# Altium footprint library ESP32-C5-MINI-1U.PcbLib: 1 footprints
Each footprint in its own frame and in the unit in brackets; x right, y up, seen from the top. Pads: shape width x height; smd on the part's side, far side on the other; paste and mask are expansions set on the pad; w line width, h text height; cw(c..) or ccw(c..) is an arc to the next point about the centre after c.
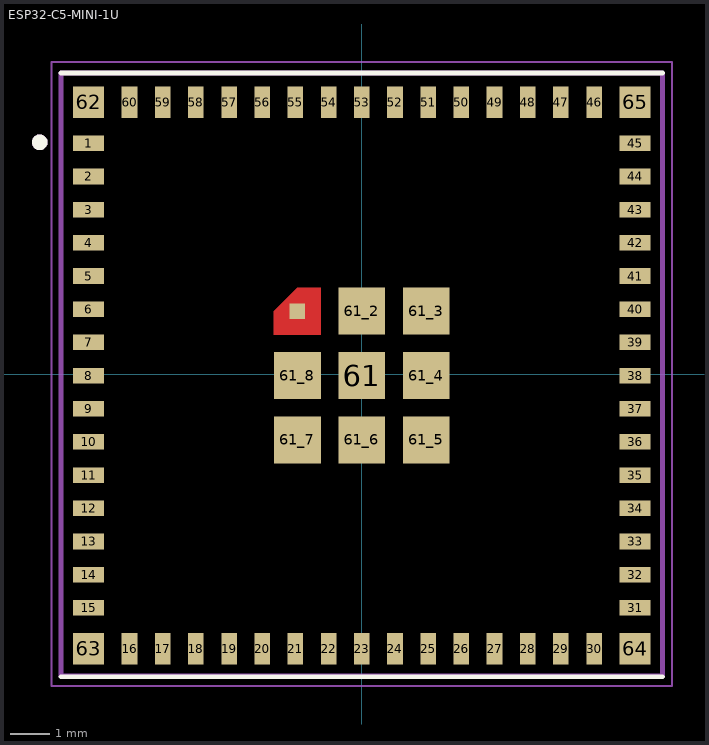
[diagram p0: the footprint, top view; thin cyan lines are the x and y axes]

## ESP32-C5-MINI-1U [mm]
pads (73):
  rect 0.8x0.4 smd paste+0 mask+0.102: 1(-7,5.921) 2(-7,5.071) 3(-7,4.221) 4(-7,3.371) 5(-7,2.521) 6(-7,1.671) 7(-7,0.821) 8(-7,-0.029) 9(-7,-0.879) 10(-7,-1.729) 11(-7,-2.579) 12(-7,-3.429) 13(-7,-4.279) 14(-7,-5.129) 15(-7,-5.979) 31(7,-5.979) 32(7,-5.129) 33(7,-4.279) 34(7,-3.429) 35(7,-2.579) 36(7,-1.729) 37(7,-0.879) 38(7,-0.029) 39(7,0.821) 40(7,1.671) 41(7,2.521) 42(7,3.371) 43(7,4.221) 44(7,5.071) 45(7,5.921)
  rect 0.4x0.8 smd paste+0 mask+0.102: 16(-5.95,-7.029) 17(-5.1,-7.029) 18(-4.25,-7.029) 19(-3.4,-7.029) 20(-2.55,-7.029) 21(-1.7,-7.029) 22(-0.85,-7.029) 23(0,-7.029) 24(0.85,-7.029) 25(1.7,-7.029) 26(2.55,-7.029) 27(3.4,-7.029) 28(4.25,-7.029) 29(5.1,-7.029) 30(5.95,-7.029) 46(5.95,6.971) 47(5.1,6.971) 48(4.25,6.971) 49(3.4,6.971) 50(2.55,6.971) 51(1.7,6.971) 52(0.85,6.971) 53(0,6.971) 54(-0.85,6.971) 55(-1.7,6.971) 56(-2.55,6.971) 57(-3.4,6.971) 58(-4.25,6.971) 59(-5.1,6.971) 60(-5.95,6.971)
  rect 1.2x1.2 smd paste+0 mask+0.102: 61(0,-0.029) 61_2(0,1.621) 61_3(1.65,1.621) 61_4(1.65,-0.029) 61_5(1.65,-1.679) 61_6(0,-1.679) 61_7(-1.65,-1.679) 61_8(-1.65,-0.029)
  rect 0.4x0.4 smd paste-1 mask+0: 61_1(-1.65,1.621)
  rect 0.8x0.8 smd paste+0 mask+0.102: 62(-7,6.971) 63(-7,-7.029) 64(7,-7.029) 65(7,6.971)
Top Layer:
  region: -1.05,1.021 -2.25,1.021 -2.25,1.621 -1.65,2.221 -1.05,2.221
Top Overlay:
  circle w0.2: c-8.25,5.946 r0.1
  lines w0.127: -7.7,-7.744 7.7,-7.744 ; -7.7,7.721 7.7,7.721
Top Paste:
  region: -1.05,1.021 -2.25,1.021 -2.25,1.621 -1.65,2.221 -1.05,2.221
Top Solder:
  region: -0.95,0.921 -2.35,0.921 -2.35,1.671 -1.7,2.321 -0.95,2.321
Mechanical 13:
  circle w0.2: c-8.25,5.946 r0.1
  lines w0.127: -7.7,7.721 7.7,7.721 ; -7.7,7.721 -7.7,-7.729 7.7,-7.729 7.7,7.721 ; -7.7,7.721 7.7,7.721
Mechanical 15:
  lines w0.05: -7.95,-7.979 7.95,-7.979 7.95,8.001 -7.95,8.001 -7.95,-7.979
3D body "ESP32-C5-MINI-1U_V1_0.STEP": height 2.43, standoff 0, extent -7.653,-7.7 7.747,7.7